# Altium integrated library EEHZA1J470P.IntLib: 1 symbol
Pins are listed as number, name and electrical type; pins without a type are passive.

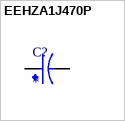
[diagram p0: symbol EEHZA1J470P]

## EEHZA1J470P
designator C?
47F 63V Aluminum - Polymer Capacitors Radial, Can - SMD 40mOhm 10000 Hrs @ 105C; MF: Panasonic; MP: EEHZA1J470P; Package: RADIAL-2 Panasonic; Price: None; Check_prices: https://www.snapeda.com/parts/EEHZA1J470P/Panasonic/view-part/?ref=eda; Value: *; SnapEDA_Link: https://www.snapeda.com/parts/EEHZA1J470P/Panasonic/view-part/?ref=snap; Availability: In Stock; Purchase-URL: https://pricing.snapeda.com/search?q=EEHZA1J470P&ref=eda
footprint CAP_EEHZA1J470P
pins: 1, 2